# Altium footprint library Diode$.PcbLib: 98 footprints (part 1 of 7)
Each footprint in its own frame and in the unit in brackets; x right, y up, seen from the top. Pads: shape width x height; smd on the part's side, far side on the other; paste and mask are expansions set on the pad; w line width, h text height; cw(c..) or ccw(c..) is an arc to the next point about the centre after c.
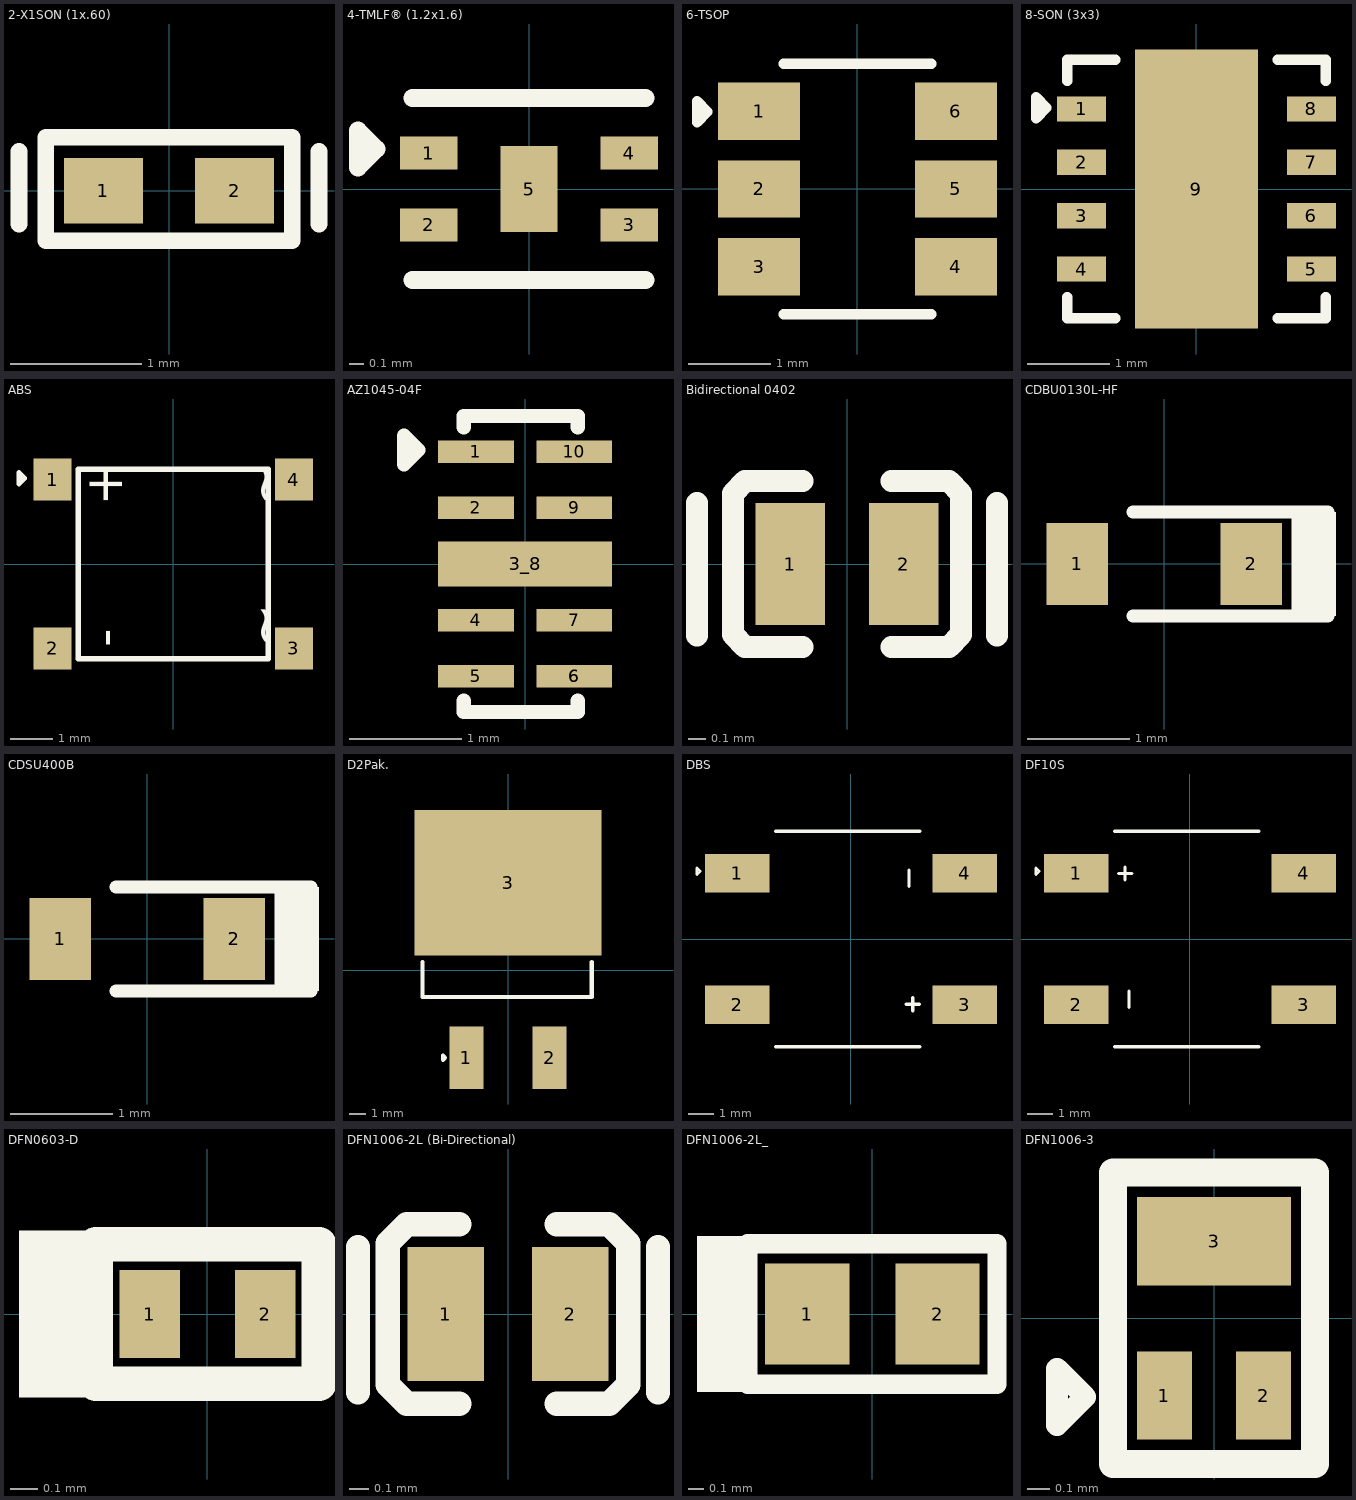
[diagram p0: the footprints below, top view; thin cyan lines are the x and y axes]

## 2-X1SON (1x.60) [mm]
pads (2):
  rect 0.6x0.5 smd: 1(-0.5,0) 2(0.5,0)
Top Overlay:
  lines w0.127: -1.143,-0.254 -1.143,0.3 ; 1.143,-0.254 1.143,0.3 ; -0.94,-0.381 -0.94,0.406 0.94,0.406 0.94,-0.381 -0.94,-0.381
3D body "step_temp.STEP": height 0.45, standoff 0, extent -0.5,-0.3 0.5,0.3

## 4-TMLF® (1.2x1.6) [mm]
pads (5):
  rect 0.4x0.23 smd: 1(-0.7,0.25) 2(-0.7,-0.25) 3(0.7,-0.25) 4(0.7,0.25)
  rect 0.4x0.6 smd: 5(0,0)
Top Overlay:
  lines w0.127: -0.813,-0.635 0.813,-0.635 ; -0.813,0.635 0.813,0.635 ; -1.194,0.152 -1.067,0.279 -1.194,0.406 -1.194,0.152
Mechanical 3:
  lines w0.127: -0.787,-0.635 0.787,-0.635 ; -0.787,0.635 0.787,0.635
3D body "TMLF-4_MCL.step": height 0.61, standoff 0, extent -0.8,-0.597 0.8,0.597

## 6-TSOP [mm]
pads (6):
  rect 1x0.7 smd paste+0 mask+0.051: 1(-1.2,0.95) 2(-1.2,0) 3(-1.2,-0.95) 4(1.2,-0.95) 5(1.2,0) 6(1.2,0.95)
Top Overlay:
  lines w0.127: -0.9,-1.524 0.9,-1.524 ; -0.9,1.524 0.9,1.524 ; -1.956,0.813 -1.956,1.067 -1.829,0.94 -1.956,0.813
3D body "IP4220CZ6_125.step": height 1.1, standoff 0, extent -1.375,-1.45 1.375,1.45

## 8-SON (3x3) [mm]
pads (9):
  rect 0.6x0.31 smd mask+0.07: 1(-1.4,0.975) 2(-1.4,0.325) 3(-1.4,-0.325) 4(-1.4,-0.975) 5(1.4,-0.975) 6(1.4,-0.325) 7(1.4,0.325) 8(1.4,0.975)
  rect 1.5x3.4 smd mask+0.07: 9(0,0)
Top Overlay:
  lines w0.127: -1.575,-1.321 -1.575,-1.575 -0.991,-1.575 ; -1.575,1.321 -1.575,1.575 -0.991,1.575 ; 0.991,-1.575 1.575,-1.575 1.575,-1.321 ; 0.991,1.575 1.575,1.575 1.575,1.321 ; -1.956,0.864 -1.956,1.118 -1.829,0.991 -1.956,0.864
3D body "TVS3301DRBR.step": height 1, standoff 0, extent -1.5,-1.5 1.5,1.5

## ABS [mm]
pads (4):
  rect 0.9x1 smd: 1(-2.86,2) 2(-2.86,-2) 3(2.86,-2) 4(2.86,2)
Top Overlay:
  lines w0.127: -3.658,1.905 -3.658,2.159 -3.531,2.032 -3.658,1.905 ; -2.25,-2.25 -2.25,2.25 2.25,2.25 2.25,-2.25 -2.25,-2.25
  text "~" at 2.565,1.38 h0.89
  text "~" at 2.565,-1.974 h0.89
  text "-" at -1.207,-1.974 h0.89
  text "+" at -1.207,1.38 h0.89
3D body "ABS.step": height 1.66, standoff 0, extent -2.806,-2.5 2.806,2.5

## AZ1045-04F [mm]
pads (10):
  rect 0.675x0.2 smd: 1(-0.437,1) 2(-0.437,0.5) 4(-0.437,-0.5) 5(-0.437,-1) 6(0.437,-1) 6(0.437,-1) 7(0.437,-0.5) 9(0.437,0.5) 10(0.437,1)
  rect 1.55x0.4 smd: 3_8(0,0)
Top Overlay:
  lines w0.127: -0.546,-1.219 -0.546,-1.321 0.47,-1.321 0.47,-1.219 ; -0.546,1.219 -0.546,1.321 0.47,1.321 0.47,1.219 ; -1.079,0.889 -1.079,1.143 -0.952,1.016 -1.079,0.889
3D body "TPD4E05U06DQAR--3DModel-STEP-56544.STEP": height 0.55, standoff 0, extent -0.5,-1.25 0.5,1.25

## Bidirectional 0402 [mm]
pads (2):
  rect 0.4x0.7 smd paste+0 mask+0.051: 1(-0.325,0) 2(0.325,0)
Top Overlay:
  lines w0.127: -0.859,-0.41 -0.859,0.35 ; -0.254,-0.475 -0.584,-0.475 -0.654,-0.405 -0.654,0.405 -0.584,0.475 -0.254,0.475 ; 0.254,-0.475 0.584,-0.475 0.654,-0.405 0.654,0.405 0.584,0.475 0.254,0.475 ; 0.859,-0.41 0.859,0.35
3D body "C316043.step": height 0.52, standoff 0, extent -0.5,-0.301 0.5,0.3

## CDBU0130L-HF [mm]
pads (2):
  rect 0.6x0.8 smd: 1(-0.85,0) 2(0.85,0)
Top Overlay:
  rectangle: 1.245,-0.508 1.676,0.508
  lines w0.127: -0.305,-0.509 1.6,-0.509 ; -0.305,0.508 1.6,0.508
3D body "C2886041.step": height 0.78, standoff 0, extent -0.85,-0.451 0.85,0.45

## CDSU400B [mm]
pads (2):
  rect 0.6x0.8 smd: 1(-0.85,0) 2(0.85,0)
Top Overlay:
  rectangle: 1.245,-0.508 1.676,0.508
  lines w0.127: -0.305,-0.509 1.6,-0.509 ; -0.305,0.508 1.6,0.508
3D body "C2886041.step": height 0.78, standoff 0, extent -0.85,-0.451 0.85,0.45

## D2Pak. [mm]
pads (3):
  rect 2.08x3.81 smd: 1(-2.54,-5.335) 2(2.54,-5.335)
  rect 11.43x8.89 smd: 3(0,5.335)
Top Overlay:
  lines w0.254: -5.207,0.508 -5.207,-1.626 5.105,-1.626 5.105,0.508 ; -3.962,-5.461 -3.835,-5.334 -3.962,-5.207 -3.962,-5.461
3D body "pwr263s-35-8r20f.stp": height 4.5, standoff 0, extent -5.075,-6.596 5.025,8.794

## DBS [mm]
pads (4):
  rect 2.5x1.5 smd: 1(-4.41,2.55) 2(-4.41,-2.55) 3(4.41,-2.55) 4(4.41,2.55)
Top Overlay:
  lines w0.1: -5.966,2.498 -5.839,2.625 -5.966,2.752 -5.966,2.498
  lines w0.127: -2.925,-4.175 2.675,-4.175 ; -2.925,4.175 2.675,4.175 ; 2.146,-2.525 2.654,-2.525 ; 2.25,2.034 2.25,2.669 ; 2.4,-2.779 2.4,-2.271
3D body "db207s_asm_WPCB.stp": height 3.41, standoff 0.1, extent -4.946,-4.105 4.946,4.105

## DF10S [mm]
pads (4):
  rect 2.5x1.5 smd: 1(-4.41,2.55) 2(-4.41,-2.55) 3(4.41,-2.55) 4(4.41,2.55)
Top Overlay:
  lines w0.1: -5.966,2.498 -5.966,2.752 -5.839,2.625 -5.966,2.498
  lines w0.127: -2.925,-4.175 2.675,-4.175 ; -2.925,4.175 2.675,4.175 ; -2.769,2.54 -2.261,2.54 ; -2.515,2.286 -2.515,2.794 ; -2.365,-2.654 -2.365,-2.019
3D body "db207s_asm_WPCB.stp": height 3.41, standoff 0.1, extent -4.946,-4.105 4.946,4.105

## DFN0603-D [mm]
pads (2):
  rect 0.22x0.32 smd mask+0.05: 1(-0.21,0) 2(0.21,0)
Top Overlay:
  rectangle: -0.686,-0.305 -0.406,0.305
  lines w0.127: -0.406,-0.254 0.406,-0.254 0.406,0.254 -0.406,0.254 -0.406,-0.254
3D body "GDZ8V2LP3-7--3DModel-STEP-1.STEP": height 0.33, standoff -0.02, extent -0.31,-0.16 0.31,0.16

## DFN1006-2L (Bi-Directional) [mm]
pads (2):
  rect 0.4x0.7 smd paste+0 mask+0.051: 1(-0.325,0) 2(0.325,0)
Top Overlay:
  lines w0.127: -0.783,-0.41 -0.783,0.35 ; -0.254,-0.469 -0.528,-0.469 -0.628,-0.369 -0.628,0.369 -0.528,0.469 -0.498,0.469 -0.254,0.469 ; 0.254,-0.469 0.528,-0.469 0.628,-0.369 0.628,0.369 0.528,0.469 0.498,0.469 0.254,0.469 ; 0.783,-0.41 0.783,0.35
3D body "SOD882.step": height 0.47, standoff 0, extent -0.5,-0.295 0.5,0.305

## DFN1006-2L_ [mm]
pads (2):
  rect 0.55x0.66 smd: 1(-0.425,0) 2(0.425,0)
Top Overlay:
  rectangle: -1.143,-0.508 -0.813,0.508
  lines w0.127: -0.813,-0.457 0.813,-0.457 0.813,0.457 -0.813,0.457 -0.813,-0.457
3D body "SOD882.step": height 0.47, standoff 0, extent -0.5,-0.305 0.5,0.295

## DFN1006-3 [mm]
pads (3):
  rect 0.25x0.4 smd: 1(-0.225,-0.35) 2(0.225,-0.35)
  rect 0.7x0.4 smd: 3(0,0.35)
Top Overlay:
  lines w0.1: -0.711,-0.483 -0.584,-0.356 -0.711,-0.229 -0.711,-0.483
  lines w0.127: -0.457,-0.66 -0.457,0.66 0.457,0.66 0.457,-0.66 -0.457,-0.66
3D body "MMBT3904LP-7--3DModel-STEP-56544.STEP": height 0.53, standoff 0, extent -0.3,-0.5 0.3,0.5